# Altium footprint library NC7WZ14P6X.PcbLib: 3 footprints
Each footprint in its own frame and in the unit in brackets; x right, y up, seen from the top. Pads: shape width x height; smd on the part's side, far side on the other; paste and mask are expansions set on the pad; w line width, h text height; cw(c..) or ccw(c..) is an arc to the next point about the centre after c.
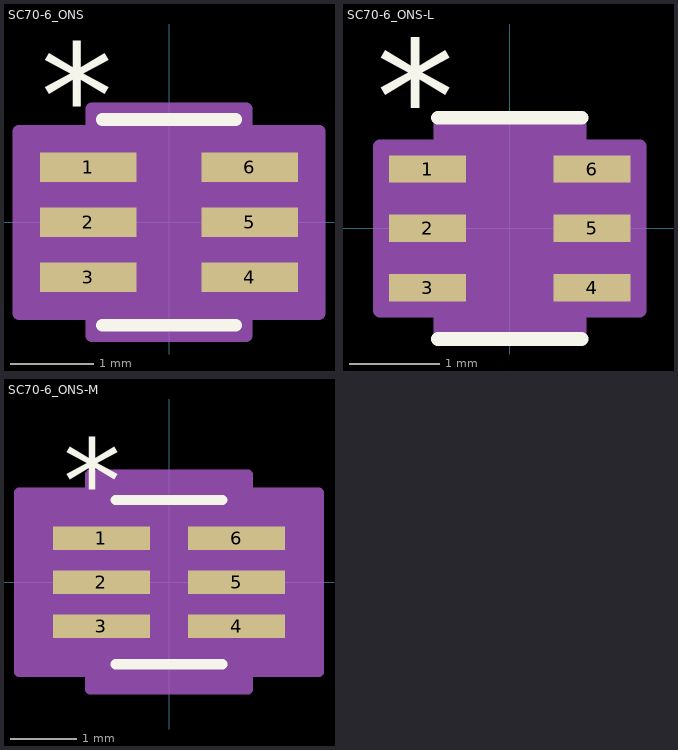
[diagram p0: the footprints below, top view; thin cyan lines are the x and y axes]

## SC70-6_ONS [mil]
pads (6):
  rect 45.56x13.97 smd paste+0 mask+0: 1(-38,26) 2(-38,0) 3(-38,-26) 4(38,-26) 5(38,0) 6(38,26)
Top Overlay:
  lines w6: -31.5,-48.5 31.5,-48.5 ; -31.5,48.5 31.5,48.5
  text ".Designator" at -137.5,-25 h50
  text "*" at -60.5,34.97 h50
Mechanical 13:
  lines w1: -12,43.5 ccw(c0,43.5) 12,43.5 ; -47,-32 -47,-20 -26.5,-20 -26.5,-32 -47,-32 ; -47,-6 -47,6 -26.5,6 -26.5,-6 -47,-6 ; -47,20 -47,32 -26.5,32 -26.5,20 -47,20 ; -26.5,-43.5 26.5,-43.5 26.5,43.5 -26.5,43.5 -26.5,-43.5 ; 26.5,-32 26.5,-20 47,-20 47,-32 26.5,-32 ; 26.5,-6 26.5,6 47,6 47,-6 26.5,-6 ; 26.5,20 26.5,32 47,32 47,20 26.5,20
  text "*" at -24,-9.5 h50
  text ".Designator" at -137.5,-25 h50
Mechanical 15:
  region: -36.5,-42.98 -70.78,-42.98 -70.78,42.98 -36.5,42.98 -36.5,53.5 36.5,53.5 36.5,42.98 70.78,42.98 70.78,-42.98 36.5,-42.98 36.5,-53.5 -36.5,-53.5
  lines w6: -70.78,-42.98 -70.78,42.98 -36.5,42.98 -36.5,53.5 36.5,53.5 36.5,42.98 70.78,42.98 70.78,-42.98 36.5,-42.98 36.5,-53.5 -36.5,-53.5 -36.5,-42.98 -70.78,-42.98
3D body "SC70-6_ONS.step": height 43.11, standoff 0, extent -47.01,-43.5 47.01,43.5

## SC70-6_ONS-L [mil]
pads (6):
  rect 33.75x12 smd paste+0 mask+0: 1(-36.03,26) 2(-36.03,0) 3(-36.03,-26) 4(36.03,-26) 5(36.03,0) 6(36.03,26)
Top Overlay:
  lines w6: -31.5,-48.5 31.5,-48.5 ; -31.5,48.5 31.5,48.5
  text ".Designator" at -137.5,-25 h50
  text "*" at -58.53,33 h50
Mechanical 13:
  lines w1: -12,43.5 ccw(c0,43.5) 12,43.5 ; -47,-32 -47,-20 -26.5,-20 -26.5,-32 -47,-32 ; -47,-6 -47,6 -26.5,6 -26.5,-6 -47,-6 ; -47,20 -47,32 -26.5,32 -26.5,20 -47,20 ; -26.5,-43.5 26.5,-43.5 26.5,43.5 -26.5,43.5 -26.5,-43.5 ; 26.5,-32 26.5,-20 47,-20 47,-32 26.5,-32 ; 26.5,-6 26.5,6 47,6 47,-6 26.5,-6 ; 26.5,20 26.5,32 47,32 47,20 26.5,20
  text "*" at -24,-9.5 h50
  text ".Designator" at -137.5,-25 h50
Mechanical 15:
  region: -30.5,-36 -56.91,-36 -56.91,36 -30.5,36 -30.5,47.5 30.5,47.5 30.5,36 56.91,36 56.91,-36 30.5,-36 30.5,-47.5 -30.5,-47.5
  lines w6: -56.91,-36 -56.91,36 -30.5,36 -30.5,47.5 30.5,47.5 30.5,36 56.91,36 56.91,-36 30.5,-36 30.5,-47.5 -30.5,-47.5 -30.5,-36 -56.91,-36
3D body "SC70-6_ONS.step": height 43.11, standoff 0, extent -47.01,-43.5 47.01,43.5

## SC70-6_ONS-M [mil]
pads (6):
  rect 57.37x13.97 smd paste+0 mask+0: 1(-39.97,26) 2(-39.97,0) 3(-39.97,-26) 4(39.97,-26) 5(39.97,0) 6(39.97,26)
Top Overlay:
  lines w6: -31.5,-48.5 31.5,-48.5 ; -31.5,48.5 31.5,48.5
  text ".Designator" at -137.5,-25 h50
  text "*" at -62.47,34.97 h50
Mechanical 13:
  lines w1: -12,43.5 ccw(c0,43.5) 12,43.5 ; -47,-32 -47,-20 -26.5,-20 -26.5,-32 -47,-32 ; -47,-6 -47,6 -26.5,6 -26.5,-6 -47,-6 ; -47,20 -47,32 -26.5,32 -26.5,20 -47,20 ; -26.5,-43.5 26.5,-43.5 26.5,43.5 -26.5,43.5 -26.5,-43.5 ; 26.5,-32 26.5,-20 47,-20 47,-32 26.5,-32 ; 26.5,-6 26.5,6 47,6 47,-6 26.5,-6 ; 26.5,20 26.5,32 47,32 47,20 26.5,20
  text "*" at -24,-9.5 h50
  text ".Designator" at -137.5,-25 h50
Mechanical 15:
  region: -46.5,-52.98 -88.65,-52.98 -88.65,52.98 -46.5,52.98 -46.5,63.5 46.5,63.5 46.5,52.98 88.65,52.98 88.65,-52.98 46.5,-52.98 46.5,-63.5 -46.5,-63.5
  lines w6: -88.65,-52.98 -88.65,52.98 -46.5,52.98 -46.5,63.5 46.5,63.5 46.5,52.98 88.65,52.98 88.65,-52.98 46.5,-52.98 46.5,-63.5 -46.5,-63.5 -46.5,-52.98 -88.65,-52.98
3D body "SC70-6_ONS.step": height 43.11, standoff 0, extent -47.01,-43.5 47.01,43.5